# Altium schematic symbol library UCC27712D.SchLib: 1 symbol
Pins are listed as number, name and electrical type; pins without a type are passive.

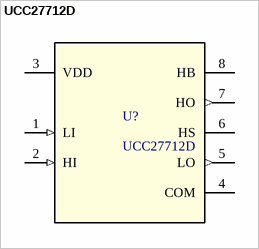
[diagram p0: symbol UCC27712D]

## UCC27712D
designator U?
1.8-A/2.8-A, 620V half bridge driver with interlock 8-SOIC -40 to 125; Manufacturer_Name: Texas Instruments; TYPE: TYPE; RefDes: RefDes; Copyright: Copyright (C) 2026 Ultra Librarian. All rights reserved.; Manufacturer_Part_Number: UCC27712D
footprint D0008A_N
pins: 1 LI (in), 2 HI (in), 3 VDD (power), 4 COM (power), 5 LO (out), 6 HS, 7 HO (out), 8 HB (power)